# EAGLE library part LATCHING-RELAY-2COIL (library moto-safety)
LATCHING-RELAY-2COIL 12V bistable (latching) 2 bobinli role - mars rolesi bobini immobilizer (varsayilan kilitsiz). Kart: 29.0 x 12.7 mm - Guven: L STEP: Uretici STEP (Hongfa HFE20 / Omron G6AK vb. secilen modele gore) NOT: Generic DIP yerlesim; secilen role modelinin datasheet'ine gore pad konumlarini duzelt.
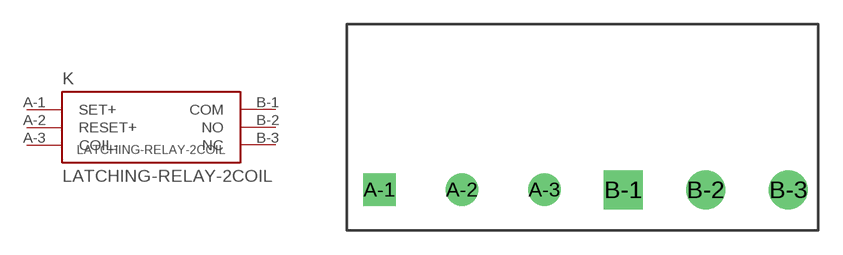
[diagram p1: symbol with the pads of LATCHING-RELAY-2COIL; footprint LATCHING-RELAY-2COIL]

Designator prefix K

## LATCHING-RELAY-2COIL (BOARD_SIZE: 29.0x12.7mm; CONFIDENCE: L)  [LATCHING-RELAY-2COIL]
A-1  SET+  pas
A-2  RESET+  pas
A-3  COIL-  pas
B-1  COM  pas
B-2  NO  pas
B-3  NC  pas

## Footprint LATCHING-RELAY-2COIL (pad centres in mm)
12V bistable (latching) 2 bobinli role - mars rolesi bobini immobilizer (varsayilan kilitsiz). | Kart: 29.0 x 12.7 mm | Guven: L
drill 1.1 pad 2 square: A-1 -12.5,-3.85
drill 1.1 pad 2 round: A-2 -7.42,-3.85; A-3 -2.34,-3.85
drill 1.3 pad 2.4 square: B-1 2.5,-3.85
drill 1.3 pad 2.4 round: B-2 7.58,-3.85; B-3 12.66,-3.85